# Altium integrated library Electromechanicals.IntLib: 16 symbols
Pins are listed as number, name and electrical type; pins without a type are passive.

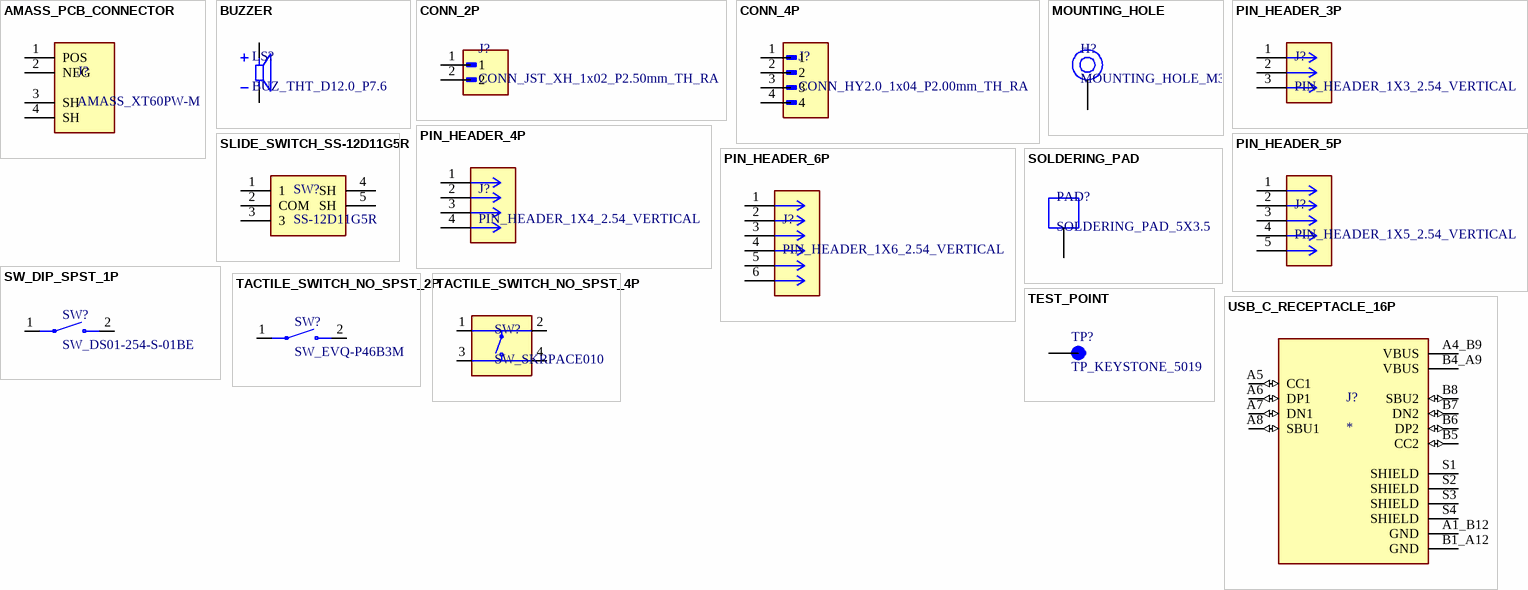
[diagram p0: symbols AMASS_PCB_CONNECTOR to USB_C_RECEPTACLE_16P]

## AMASS_PCB_CONNECTOR
designator J?
GENERIC AMASS PCB CONNECTOR; MF: Amass; LCSC Part Number: *; MPN: *
footprint AMASS_XT60PW-M
footprint AMASS_XT30PW-M
footprint AMASS_XT30PW-F
pins: 1 POS, 2 NEG, 3 SH, 4 SH

## BUZZER
designator LS?
GENERIC BUZZER; MF: *; MPN: *; Type: *; SPL: *; LCSC Part Number: *
footprint BUZ_THT_D12.0_P7.6
pins: N, P

## CONN_2P
designator J?
GENERIC CONNECTOR 2P; MF: *; MPN: *; LCSC Part Number: *
footprint CONN_JST_XH_1x02_P2.50mm_TH_RA
footprint CONN_JST_XH_1x02_P2.50mm_TH_ST
pins: 1, 2

## CONN_4P
designator J?
GENERIC CONNECTOR 4P; MF: *; MPN: *; LCSC Part Number: *
footprint CONN_HY2.0_1x04_P2.00mm_TH_RA
pins: 1, 2, 3, 4

## MOUNTING_HOLE
designator H?  (no BOM)
GENERIC MOUNTING HOLE
footprint MOUNTING_HOLE_M3
footprint MOUNTING_HOLE_M2
pins: 1

## PIN_HEADER_3P
designator J?
GENERIC PIN HEADER 3P; MF: *; MPN: *; LCSC Part Number: *
footprint PIN_HEADER_1X3_2.54_VERTICAL
pins: 1, 2, 3

## PIN_HEADER_4P
designator J?
GENERIC PIN HEADER 4P; MF: *; MPN: *; LCSC Part Number: *
footprint PIN_HEADER_1X4_2.54_VERTICAL
pins: 1, 2, 3, 4

## PIN_HEADER_5P
designator J?
GENERIC PIN HEADER 5P; MF: *; MPN: *; LCSC Part Number: *
footprint PIN_HEADER_1X5_2.54_VERTICAL
pins: 1, 2, 3, 4, 5

## PIN_HEADER_6P
designator J?
GENERIC PIN HEADER 6P; MF: *; MPN: *; LCSC Part Number: *
footprint PIN_HEADER_1X6_2.54_VERTICAL
pins: 1, 2, 3, 4, 5, 6

## SLIDE_SWITCH_SS-12D11G5R
designator SW?, comment SS-12D11G5R
SLIDE SWITCH SS-12D11G5R; MF: XKB Connectivity; MPN: SS-12D11G5R; LCSC Part Number: C388633
footprint SLIDE_SWITCH_SS-12D11G5R
pins: 1, 2 COM, 3, 4 SH, 5 SH

## SOLDERING_PAD
designator PAD?  (no BOM)
GENERIC SOLDERING PAD
footprint SOLDERING_PAD_5X3.5
pins: 1

## SW_DIP_SPST_1P
designator SW?
GENERIC DIP SWITCH SPST 1 POLE; MF: *; MPN: *; LCSC Part Number: *
footprint SW_DS01-254-S-01BE
footprint SW_KAE01SGGT
pins: 1, 2

## TACTILE_SWITCH_NO_SPST_2P
designator SW?
GENERIC TACTILE SWITCH NO SPST 2P; MF: *; MPN: *; LCSC Part Number: *
footprint SW_EVQ-P46B3M
footprint SW_TS-1088-AR02016
pins: 1, 2

## TACTILE_SWITCH_NO_SPST_4P
designator SW?
GENERIC TACTILE SWITCH NO SPST 4P; MF: *; MPN: *; LCSC Part Number: *
footprint SW_SKRPACE010
pins: 1, 2, 3, 4

## TEST_POINT
designator TP?
GENERIC TEST POINT; MF: *; MPN: *
footprint TP_KEYSTONE_5019
footprint TP_1MM
footprint TP_0.8MM
pins: TP

## USB_C_RECEPTACLE_16P
designator J?
GENERIC USB C RECEPTACLE 16P; MF: *; MPN: *; LCSC Part Number: *
footprint USB_C_HRO_TYPE-C-31-M-12
pins: A1_B12 GND (power), A4_B9 VBUS (power), A5 CC1 (io), A6 DP1 (io), A7 DN1 (io), A8 SBU1 (io), B1_A12 GND (power), B4_A9 VBUS (power), B5 CC2 (io), B6 DP2 (io), B7 DN2 (io), B8 SBU2 (io), S1 SHIELD, S2 SHIELD, S3 SHIELD, S4 SHIELD